# Altium footprint library basicfootprints.PcbLib: 522 footprints (part 24 of 33)
Each footprint in its own frame and in the unit in brackets; x right, y up, seen from the top. Pads: shape width x height; smd on the part's side, far side on the other; paste and mask are expansions set on the pad; w line width, h text height; cw(c..) or ccw(c..) is an arc to the next point about the centre after c.
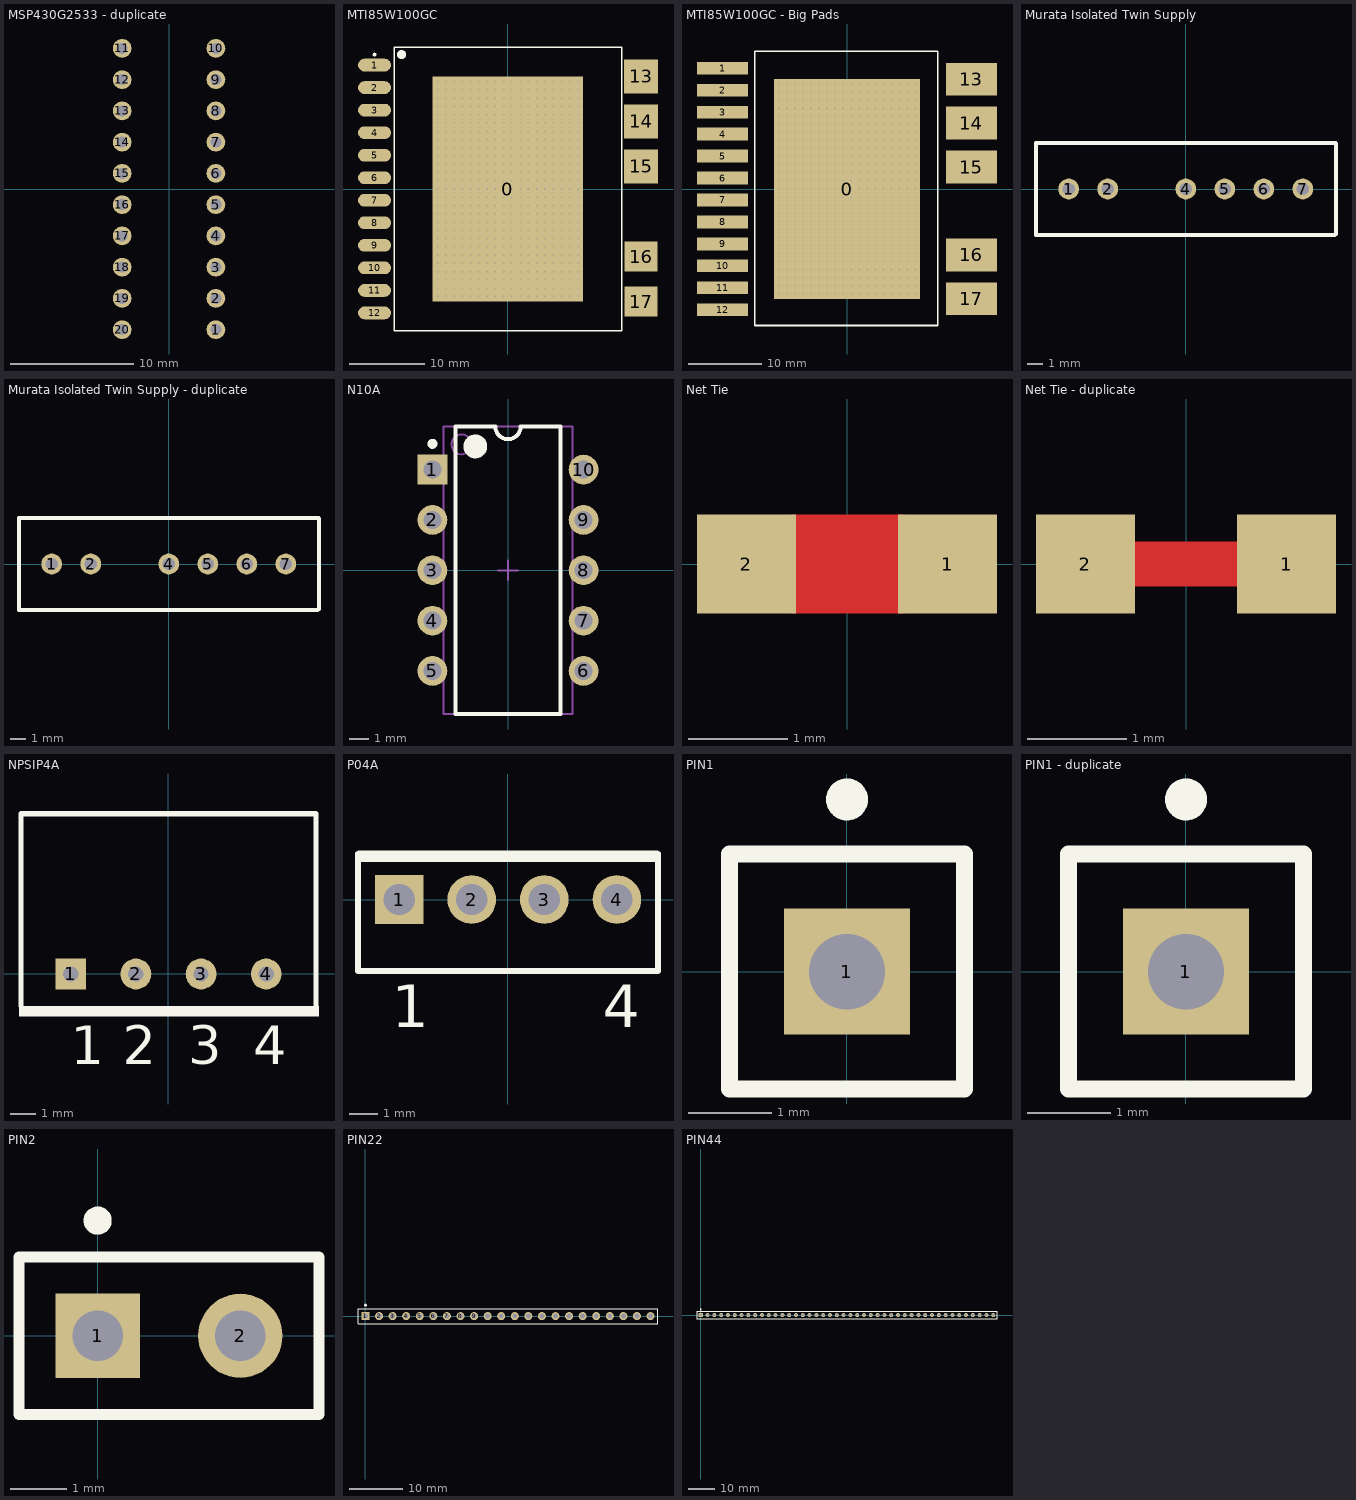
[diagram p23: the footprints below, top view; thin cyan lines are the x and y axes]

## MSP430G2533 - duplicate [mil] "20-pin DIP"
pads (20):
  round 60 hole 35: 1(150,-450) 2(150,-350) 3(150,-250) 4(150,-150) 5(150,-50) 6(150,50) 7(150,150) 8(150,250) 9(150,350) 10(150,450) 11(-150,450) 12(-150,350) 13(-150,250) 14(-150,150) 15(-150,50) 16(-150,-50) 17(-150,-150) 18(-150,-250) 19(-150,-350) 20(-150,-450)

## MTI85W100GC [mm] "3-Phase Bridge, 3.2mOhm"
height 5.1
pads (18):
  rect 20x30 smd: 0(0,0)
  oval 4.4x1.7 smd: 1(-17.75,16.5) 2(-17.75,13.5) 3(-17.75,10.5) 4(-17.75,7.5) 5(-17.75,4.5) 6(-17.75,1.5) 7(-17.75,-1.5) 8(-17.75,-4.5) 9(-17.75,-7.5) 10(-17.75,-10.5) 11(-17.75,-13.5) 12(-17.75,-16.5)
  rect 4.5x4.5 smd: 13(17.75,15) 14(17.75,9) 15(17.75,3)
  rect 4.4x4 smd: 16(17.75,-9) 17(17.75,-15)
via 9.35,-14.3 diameter 0.5 hole 0.2
via 8.25,-14.3 diameter 0.5 hole 0.2
via 7.15,-14.3 diameter 0.5 hole 0.2
via 6.05,-14.3 diameter 0.5 hole 0.2
via 4.95,-14.3 diameter 0.5 hole 0.2
via 3.85,-14.3 diameter 0.5 hole 0.2
via 2.75,-14.3 diameter 0.5 hole 0.2
via 1.65,-14.3 diameter 0.5 hole 0.2
via 0.55,-14.3 diameter 0.5 hole 0.2
via -0.55,-14.3 diameter 0.5 hole 0.2
via -1.65,-14.3 diameter 0.5 hole 0.2
via -2.75,-14.3 diameter 0.5 hole 0.2
via -3.85,-14.3 diameter 0.5 hole 0.2
via -4.95,-14.3 diameter 0.5 hole 0.2
via -6.05,-14.3 diameter 0.5 hole 0.2
via -7.15,-14.3 diameter 0.5 hole 0.2
via -8.25,-14.3 diameter 0.5 hole 0.2
via -9.35,-14.3 diameter 0.5 hole 0.2
via 9.35,-13.2 diameter 0.5 hole 0.2
via 8.25,-13.2 diameter 0.5 hole 0.2
via 7.15,-13.2 diameter 0.5 hole 0.2
via 6.05,-13.2 diameter 0.5 hole 0.2
via 4.95,-13.2 diameter 0.5 hole 0.2
via 3.85,-13.2 diameter 0.5 hole 0.2
via 2.75,-13.2 diameter 0.5 hole 0.2
via 1.65,-13.2 diameter 0.5 hole 0.2
via 0.55,-13.2 diameter 0.5 hole 0.2
via -0.55,-13.2 diameter 0.5 hole 0.2
via -1.65,-13.2 diameter 0.5 hole 0.2
via -2.75,-13.2 diameter 0.5 hole 0.2
via -3.85,-13.2 diameter 0.5 hole 0.2
via -4.95,-13.2 diameter 0.5 hole 0.2
via -6.05,-13.2 diameter 0.5 hole 0.2
via -7.15,-13.2 diameter 0.5 hole 0.2
via -8.25,-13.2 diameter 0.5 hole 0.2
via -9.35,-13.2 diameter 0.5 hole 0.2
via 9.35,-12.1 diameter 0.5 hole 0.2
via 8.25,-12.1 diameter 0.5 hole 0.2
via 7.15,-12.1 diameter 0.5 hole 0.2
via 6.05,-12.1 diameter 0.5 hole 0.2
via 4.95,-12.1 diameter 0.5 hole 0.2
via 3.85,-12.1 diameter 0.5 hole 0.2
via 2.75,-12.1 diameter 0.5 hole 0.2
via 1.65,-12.1 diameter 0.5 hole 0.2
via 0.55,-12.1 diameter 0.5 hole 0.2
via -0.55,-12.1 diameter 0.5 hole 0.2
via -1.65,-12.1 diameter 0.5 hole 0.2
via -2.75,-12.1 diameter 0.5 hole 0.2
via -3.85,-12.1 diameter 0.5 hole 0.2
via -4.95,-12.1 diameter 0.5 hole 0.2
via -6.05,-12.1 diameter 0.5 hole 0.2
via -7.15,-12.1 diameter 0.5 hole 0.2
via -8.25,-12.1 diameter 0.5 hole 0.2
via -9.35,-12.1 diameter 0.5 hole 0.2
via 9.35,-11 diameter 0.5 hole 0.2
via 8.25,-11 diameter 0.5 hole 0.2
via 7.15,-11 diameter 0.5 hole 0.2
via 6.05,-11 diameter 0.5 hole 0.2
via 4.95,-11 diameter 0.5 hole 0.2
via 3.85,-11 diameter 0.5 hole 0.2
via 2.75,-11 diameter 0.5 hole 0.2
via 1.65,-11 diameter 0.5 hole 0.2
via 0.55,-11 diameter 0.5 hole 0.2
via -0.55,-11 diameter 0.5 hole 0.2
via -1.65,-11 diameter 0.5 hole 0.2
via -2.75,-11 diameter 0.5 hole 0.2
via -3.85,-11 diameter 0.5 hole 0.2
via -4.95,-11 diameter 0.5 hole 0.2
via -6.05,-11 diameter 0.5 hole 0.2
via -7.15,-11 diameter 0.5 hole 0.2
via -8.25,-11 diameter 0.5 hole 0.2
via -9.35,-11 diameter 0.5 hole 0.2
via 9.35,-9.9 diameter 0.5 hole 0.2
via 8.25,-9.9 diameter 0.5 hole 0.2
via 7.15,-9.9 diameter 0.5 hole 0.2
via 6.05,-9.9 diameter 0.5 hole 0.2
via 4.95,-9.9 diameter 0.5 hole 0.2
via 3.85,-9.9 diameter 0.5 hole 0.2
via 2.75,-9.9 diameter 0.5 hole 0.2
via 1.65,-9.9 diameter 0.5 hole 0.2
via 0.55,-9.9 diameter 0.5 hole 0.2
via -0.55,-9.9 diameter 0.5 hole 0.2
via -1.65,-9.9 diameter 0.5 hole 0.2
via -2.75,-9.9 diameter 0.5 hole 0.2
via -3.85,-9.9 diameter 0.5 hole 0.2
via -4.95,-9.9 diameter 0.5 hole 0.2
via -6.05,-9.9 diameter 0.5 hole 0.2
via -7.15,-9.9 diameter 0.5 hole 0.2
via -8.25,-9.9 diameter 0.5 hole 0.2
via -9.35,-9.9 diameter 0.5 hole 0.2
via 9.35,-8.8 diameter 0.5 hole 0.2
via 8.25,-8.8 diameter 0.5 hole 0.2
via 7.15,-8.8 diameter 0.5 hole 0.2
via 6.05,-8.8 diameter 0.5 hole 0.2
via 4.95,-8.8 diameter 0.5 hole 0.2
via 3.85,-8.8 diameter 0.5 hole 0.2
via 2.75,-8.8 diameter 0.5 hole 0.2
via 1.65,-8.8 diameter 0.5 hole 0.2
via 0.55,-8.8 diameter 0.5 hole 0.2
via -0.55,-8.8 diameter 0.5 hole 0.2
via -1.65,-8.8 diameter 0.5 hole 0.2
via -2.75,-8.8 diameter 0.5 hole 0.2
via -3.85,-8.8 diameter 0.5 hole 0.2
via -4.95,-8.8 diameter 0.5 hole 0.2
via -6.05,-8.8 diameter 0.5 hole 0.2
via -7.15,-8.8 diameter 0.5 hole 0.2
via -8.25,-8.8 diameter 0.5 hole 0.2
via -9.35,-8.8 diameter 0.5 hole 0.2
via 9.35,-7.7 diameter 0.5 hole 0.2
via 8.25,-7.7 diameter 0.5 hole 0.2
via 7.15,-7.7 diameter 0.5 hole 0.2
via 6.05,-7.7 diameter 0.5 hole 0.2
via 4.95,-7.7 diameter 0.5 hole 0.2
via 3.85,-7.7 diameter 0.5 hole 0.2
via 2.75,-7.7 diameter 0.5 hole 0.2
via 1.65,-7.7 diameter 0.5 hole 0.2
via 0.55,-7.7 diameter 0.5 hole 0.2
via -0.55,-7.7 diameter 0.5 hole 0.2
via -1.65,-7.7 diameter 0.5 hole 0.2
via -2.75,-7.7 diameter 0.5 hole 0.2
via -3.85,-7.7 diameter 0.5 hole 0.2
via -4.95,-7.7 diameter 0.5 hole 0.2
via -6.05,-7.7 diameter 0.5 hole 0.2
via -7.15,-7.7 diameter 0.5 hole 0.2
via -8.25,-7.7 diameter 0.5 hole 0.2
via -9.35,-7.7 diameter 0.5 hole 0.2
via 9.35,-6.6 diameter 0.5 hole 0.2
via 8.25,-6.6 diameter 0.5 hole 0.2
via 7.15,-6.6 diameter 0.5 hole 0.2
via 6.05,-6.6 diameter 0.5 hole 0.2
via 4.95,-6.6 diameter 0.5 hole 0.2
via 3.85,-6.6 diameter 0.5 hole 0.2
via 2.75,-6.6 diameter 0.5 hole 0.2
via 1.65,-6.6 diameter 0.5 hole 0.2
via 0.55,-6.6 diameter 0.5 hole 0.2
via -0.55,-6.6 diameter 0.5 hole 0.2
via -1.65,-6.6 diameter 0.5 hole 0.2
via -2.75,-6.6 diameter 0.5 hole 0.2
via -3.85,-6.6 diameter 0.5 hole 0.2
via -4.95,-6.6 diameter 0.5 hole 0.2
via -6.05,-6.6 diameter 0.5 hole 0.2
via -7.15,-6.6 diameter 0.5 hole 0.2
via -8.25,-6.6 diameter 0.5 hole 0.2
via -9.35,-6.6 diameter 0.5 hole 0.2
via 9.35,-5.5 diameter 0.5 hole 0.2
via 8.25,-5.5 diameter 0.5 hole 0.2
via 7.15,-5.5 diameter 0.5 hole 0.2
via 6.05,-5.5 diameter 0.5 hole 0.2
via 4.95,-5.5 diameter 0.5 hole 0.2
via 3.85,-5.5 diameter 0.5 hole 0.2
via 2.75,-5.5 diameter 0.5 hole 0.2
via 1.65,-5.5 diameter 0.5 hole 0.2
via 0.55,-5.5 diameter 0.5 hole 0.2
via -0.55,-5.5 diameter 0.5 hole 0.2
via -1.65,-5.5 diameter 0.5 hole 0.2
via -2.75,-5.5 diameter 0.5 hole 0.2
via -3.85,-5.5 diameter 0.5 hole 0.2
via -4.95,-5.5 diameter 0.5 hole 0.2
via -6.05,-5.5 diameter 0.5 hole 0.2
via -7.15,-5.5 diameter 0.5 hole 0.2
via -8.25,-5.5 diameter 0.5 hole 0.2
via -9.35,-5.5 diameter 0.5 hole 0.2
via 9.35,-4.4 diameter 0.5 hole 0.2
via 8.25,-4.4 diameter 0.5 hole 0.2
via 7.15,-4.4 diameter 0.5 hole 0.2
via 6.05,-4.4 diameter 0.5 hole 0.2
via 4.95,-4.4 diameter 0.5 hole 0.2
via 3.85,-4.4 diameter 0.5 hole 0.2
via 2.75,-4.4 diameter 0.5 hole 0.2
via 1.65,-4.4 diameter 0.5 hole 0.2
via 0.55,-4.4 diameter 0.5 hole 0.2
via -0.55,-4.4 diameter 0.5 hole 0.2
via -1.65,-4.4 diameter 0.5 hole 0.2
via -2.75,-4.4 diameter 0.5 hole 0.2
via -3.85,-4.4 diameter 0.5 hole 0.2
via -4.95,-4.4 diameter 0.5 hole 0.2
via -6.05,-4.4 diameter 0.5 hole 0.2
via -7.15,-4.4 diameter 0.5 hole 0.2
via -8.25,-4.4 diameter 0.5 hole 0.2
via -9.35,-4.4 diameter 0.5 hole 0.2
via 9.35,-3.3 diameter 0.5 hole 0.2
via 8.25,-3.3 diameter 0.5 hole 0.2
via 7.15,-3.3 diameter 0.5 hole 0.2
via 6.05,-3.3 diameter 0.5 hole 0.2
via 4.95,-3.3 diameter 0.5 hole 0.2
via 3.85,-3.3 diameter 0.5 hole 0.2
via 2.75,-3.3 diameter 0.5 hole 0.2
via 1.65,-3.3 diameter 0.5 hole 0.2
via 0.55,-3.3 diameter 0.5 hole 0.2
via -0.55,-3.3 diameter 0.5 hole 0.2
via -1.65,-3.3 diameter 0.5 hole 0.2
via -2.75,-3.3 diameter 0.5 hole 0.2
via -3.85,-3.3 diameter 0.5 hole 0.2
via -4.95,-3.3 diameter 0.5 hole 0.2
via -6.05,-3.3 diameter 0.5 hole 0.2
via -7.15,-3.3 diameter 0.5 hole 0.2
via -8.25,-3.3 diameter 0.5 hole 0.2
via -9.35,-3.3 diameter 0.5 hole 0.2
via 9.35,-2.2 diameter 0.5 hole 0.2
via 8.25,-2.2 diameter 0.5 hole 0.2
via 7.15,-2.2 diameter 0.5 hole 0.2
via 6.05,-2.2 diameter 0.5 hole 0.2
via 4.95,-2.2 diameter 0.5 hole 0.2
via 3.85,-2.2 diameter 0.5 hole 0.2
via 2.75,-2.2 diameter 0.5 hole 0.2
via 1.65,-2.2 diameter 0.5 hole 0.2
via 0.55,-2.2 diameter 0.5 hole 0.2
via -0.55,-2.2 diameter 0.5 hole 0.2
via -1.65,-2.2 diameter 0.5 hole 0.2
via -2.75,-2.2 diameter 0.5 hole 0.2
via -3.85,-2.2 diameter 0.5 hole 0.2
via -4.95,-2.2 diameter 0.5 hole 0.2
via -6.05,-2.2 diameter 0.5 hole 0.2
via -7.15,-2.2 diameter 0.5 hole 0.2
via -8.25,-2.2 diameter 0.5 hole 0.2
via -9.35,-2.2 diameter 0.5 hole 0.2
via 9.35,-1.1 diameter 0.5 hole 0.2
via 8.25,-1.1 diameter 0.5 hole 0.2
via 7.15,-1.1 diameter 0.5 hole 0.2
via 6.05,-1.1 diameter 0.5 hole 0.2
via 4.95,-1.1 diameter 0.5 hole 0.2
via 3.85,-1.1 diameter 0.5 hole 0.2
via 2.75,-1.1 diameter 0.5 hole 0.2
via 1.65,-1.1 diameter 0.5 hole 0.2
via 0.55,-1.1 diameter 0.5 hole 0.2
via -0.55,-1.1 diameter 0.5 hole 0.2
via -1.65,-1.1 diameter 0.5 hole 0.2
via -2.75,-1.1 diameter 0.5 hole 0.2
via -3.85,-1.1 diameter 0.5 hole 0.2
via -4.95,-1.1 diameter 0.5 hole 0.2
via -6.05,-1.1 diameter 0.5 hole 0.2
via -7.15,-1.1 diameter 0.5 hole 0.2
via -8.25,-1.1 diameter 0.5 hole 0.2
via -9.35,-1.1 diameter 0.5 hole 0.2
via 9.35,0 diameter 0.5 hole 0.2
via 8.25,0 diameter 0.5 hole 0.2
via 7.15,0 diameter 0.5 hole 0.2
via 6.05,0 diameter 0.5 hole 0.2
via 4.95,0 diameter 0.5 hole 0.2
via 3.85,0 diameter 0.5 hole 0.2
via 2.75,0 diameter 0.5 hole 0.2
via 1.65,0 diameter 0.5 hole 0.2
via 0.55,0 diameter 0.5 hole 0.2
via -0.55,0 diameter 0.5 hole 0.2
via -1.65,0 diameter 0.5 hole 0.2
via -2.75,0 diameter 0.5 hole 0.2
via -3.85,0 diameter 0.5 hole 0.2
via -4.95,0 diameter 0.5 hole 0.2
via -6.05,0 diameter 0.5 hole 0.2
via -7.15,0 diameter 0.5 hole 0.2
via -8.25,0 diameter 0.5 hole 0.2
via -9.35,0 diameter 0.5 hole 0.2
via 9.35,1.1 diameter 0.5 hole 0.2
via 8.25,1.1 diameter 0.5 hole 0.2
via 7.15,1.1 diameter 0.5 hole 0.2
via 6.05,1.1 diameter 0.5 hole 0.2
via 4.95,1.1 diameter 0.5 hole 0.2
via 3.85,1.1 diameter 0.5 hole 0.2
via 2.75,1.1 diameter 0.5 hole 0.2
via 1.65,1.1 diameter 0.5 hole 0.2
via 0.55,1.1 diameter 0.5 hole 0.2
via -0.55,1.1 diameter 0.5 hole 0.2
via -1.65,1.1 diameter 0.5 hole 0.2
via -2.75,1.1 diameter 0.5 hole 0.2
via -3.85,1.1 diameter 0.5 hole 0.2
via -4.95,1.1 diameter 0.5 hole 0.2
via -6.05,1.1 diameter 0.5 hole 0.2
via -7.15,1.1 diameter 0.5 hole 0.2
via -8.25,1.1 diameter 0.5 hole 0.2
via -9.35,1.1 diameter 0.5 hole 0.2
via 9.35,2.2 diameter 0.5 hole 0.2
via 8.25,2.2 diameter 0.5 hole 0.2
via 7.15,2.2 diameter 0.5 hole 0.2
via 6.05,2.2 diameter 0.5 hole 0.2
via 4.95,2.2 diameter 0.5 hole 0.2
via 3.85,2.2 diameter 0.5 hole 0.2
via 2.75,2.2 diameter 0.5 hole 0.2
via 1.65,2.2 diameter 0.5 hole 0.2
via 0.55,2.2 diameter 0.5 hole 0.2
via -0.55,2.2 diameter 0.5 hole 0.2
via -1.65,2.2 diameter 0.5 hole 0.2
via -2.75,2.2 diameter 0.5 hole 0.2
via -3.85,2.2 diameter 0.5 hole 0.2
via -4.95,2.2 diameter 0.5 hole 0.2
via -6.05,2.2 diameter 0.5 hole 0.2
via -7.15,2.2 diameter 0.5 hole 0.2
via -8.25,2.2 diameter 0.5 hole 0.2
via -9.35,2.2 diameter 0.5 hole 0.2
via 9.35,3.3 diameter 0.5 hole 0.2
via 8.25,3.3 diameter 0.5 hole 0.2
via 7.15,3.3 diameter 0.5 hole 0.2
via 6.05,3.3 diameter 0.5 hole 0.2
via 4.95,3.3 diameter 0.5 hole 0.2
via 3.85,3.3 diameter 0.5 hole 0.2
via 2.75,3.3 diameter 0.5 hole 0.2
via 1.65,3.3 diameter 0.5 hole 0.2
via 0.55,3.3 diameter 0.5 hole 0.2
via -0.55,3.3 diameter 0.5 hole 0.2
via -1.65,3.3 diameter 0.5 hole 0.2
via -2.75,3.3 diameter 0.5 hole 0.2
via -3.85,3.3 diameter 0.5 hole 0.2
via -4.95,3.3 diameter 0.5 hole 0.2
via -6.05,3.3 diameter 0.5 hole 0.2
via -7.15,3.3 diameter 0.5 hole 0.2
via -8.25,3.3 diameter 0.5 hole 0.2
via -9.35,3.3 diameter 0.5 hole 0.2
via 9.35,4.4 diameter 0.5 hole 0.2
via 8.25,4.4 diameter 0.5 hole 0.2
via 7.15,4.4 diameter 0.5 hole 0.2
via 6.05,4.4 diameter 0.5 hole 0.2
via 4.95,4.4 diameter 0.5 hole 0.2
via 3.85,4.4 diameter 0.5 hole 0.2
via 2.75,4.4 diameter 0.5 hole 0.2
via 1.65,4.4 diameter 0.5 hole 0.2
via 0.55,4.4 diameter 0.5 hole 0.2
via -0.55,4.4 diameter 0.5 hole 0.2
via -1.65,4.4 diameter 0.5 hole 0.2
via -2.75,4.4 diameter 0.5 hole 0.2
via -3.85,4.4 diameter 0.5 hole 0.2
via -4.95,4.4 diameter 0.5 hole 0.2
via -6.05,4.4 diameter 0.5 hole 0.2
via -7.15,4.4 diameter 0.5 hole 0.2
via -8.25,4.4 diameter 0.5 hole 0.2
via -9.35,4.4 diameter 0.5 hole 0.2
via 9.35,5.5 diameter 0.5 hole 0.2
via 8.25,5.5 diameter 0.5 hole 0.2
via 7.15,5.5 diameter 0.5 hole 0.2
via 6.05,5.5 diameter 0.5 hole 0.2
via 4.95,5.5 diameter 0.5 hole 0.2
via 3.85,5.5 diameter 0.5 hole 0.2
via 2.75,5.5 diameter 0.5 hole 0.2
via 1.65,5.5 diameter 0.5 hole 0.2
via 0.55,5.5 diameter 0.5 hole 0.2
via -0.55,5.5 diameter 0.5 hole 0.2
via -1.65,5.5 diameter 0.5 hole 0.2
via -2.75,5.5 diameter 0.5 hole 0.2
via -3.85,5.5 diameter 0.5 hole 0.2
via -4.95,5.5 diameter 0.5 hole 0.2
via -6.05,5.5 diameter 0.5 hole 0.2
via -7.15,5.5 diameter 0.5 hole 0.2
via -8.25,5.5 diameter 0.5 hole 0.2
via -9.35,5.5 diameter 0.5 hole 0.2
via 9.35,6.6 diameter 0.5 hole 0.2
via 8.25,6.6 diameter 0.5 hole 0.2
via 7.15,6.6 diameter 0.5 hole 0.2
via 6.05,6.6 diameter 0.5 hole 0.2
via 4.95,6.6 diameter 0.5 hole 0.2
via 3.85,6.6 diameter 0.5 hole 0.2
via 2.75,6.6 diameter 0.5 hole 0.2
via 1.65,6.6 diameter 0.5 hole 0.2
via 0.55,6.6 diameter 0.5 hole 0.2
via -0.55,6.6 diameter 0.5 hole 0.2
via -1.65,6.6 diameter 0.5 hole 0.2
via -2.75,6.6 diameter 0.5 hole 0.2
via -3.85,6.6 diameter 0.5 hole 0.2
via -4.95,6.6 diameter 0.5 hole 0.2
via -6.05,6.6 diameter 0.5 hole 0.2
via -7.15,6.6 diameter 0.5 hole 0.2
via -8.25,6.6 diameter 0.5 hole 0.2
via -9.35,6.6 diameter 0.5 hole 0.2
via 9.35,7.7 diameter 0.5 hole 0.2
via 8.25,7.7 diameter 0.5 hole 0.2
via 7.15,7.7 diameter 0.5 hole 0.2
via 6.05,7.7 diameter 0.5 hole 0.2
via 4.95,7.7 diameter 0.5 hole 0.2
via 3.85,7.7 diameter 0.5 hole 0.2
via 2.75,7.7 diameter 0.5 hole 0.2
via 1.65,7.7 diameter 0.5 hole 0.2
via 0.55,7.7 diameter 0.5 hole 0.2
via -0.55,7.7 diameter 0.5 hole 0.2
via -1.65,7.7 diameter 0.5 hole 0.2
via -2.75,7.7 diameter 0.5 hole 0.2
via -3.85,7.7 diameter 0.5 hole 0.2
via -4.95,7.7 diameter 0.5 hole 0.2
via -6.05,7.7 diameter 0.5 hole 0.2
via -7.15,7.7 diameter 0.5 hole 0.2
via -8.25,7.7 diameter 0.5 hole 0.2
via -9.35,7.7 diameter 0.5 hole 0.2
via 9.35,8.8 diameter 0.5 hole 0.2
via 8.25,8.8 diameter 0.5 hole 0.2
via 7.15,8.8 diameter 0.5 hole 0.2
via 6.05,8.8 diameter 0.5 hole 0.2
via 4.95,8.8 diameter 0.5 hole 0.2
via 3.85,8.8 diameter 0.5 hole 0.2
via 2.75,8.8 diameter 0.5 hole 0.2
via 1.65,8.8 diameter 0.5 hole 0.2
via 0.55,8.8 diameter 0.5 hole 0.2
via -0.55,8.8 diameter 0.5 hole 0.2
via -1.65,8.8 diameter 0.5 hole 0.2
via -2.75,8.8 diameter 0.5 hole 0.2
via -3.85,8.8 diameter 0.5 hole 0.2
via -4.95,8.8 diameter 0.5 hole 0.2
via -6.05,8.8 diameter 0.5 hole 0.2
via -7.15,8.8 diameter 0.5 hole 0.2
via -8.25,8.8 diameter 0.5 hole 0.2
via -9.35,8.8 diameter 0.5 hole 0.2
via 9.35,9.9 diameter 0.5 hole 0.2
via 8.25,9.9 diameter 0.5 hole 0.2
via 7.15,9.9 diameter 0.5 hole 0.2
via 6.05,9.9 diameter 0.5 hole 0.2
via 4.95,9.9 diameter 0.5 hole 0.2
via 3.85,9.9 diameter 0.5 hole 0.2
via 2.75,9.9 diameter 0.5 hole 0.2
via 1.65,9.9 diameter 0.5 hole 0.2
via 0.55,9.9 diameter 0.5 hole 0.2
via -0.55,9.9 diameter 0.5 hole 0.2
via -1.65,9.9 diameter 0.5 hole 0.2
via -2.75,9.9 diameter 0.5 hole 0.2
via -3.85,9.9 diameter 0.5 hole 0.2
via -4.95,9.9 diameter 0.5 hole 0.2
via -6.05,9.9 diameter 0.5 hole 0.2
via -7.15,9.9 diameter 0.5 hole 0.2
via -8.25,9.9 diameter 0.5 hole 0.2
via -9.35,9.9 diameter 0.5 hole 0.2
via 9.35,11 diameter 0.5 hole 0.2
via 8.25,11 diameter 0.5 hole 0.2
via 7.15,11 diameter 0.5 hole 0.2
via 6.05,11 diameter 0.5 hole 0.2
via 4.95,11 diameter 0.5 hole 0.2
via 3.85,11 diameter 0.5 hole 0.2
via 2.75,11 diameter 0.5 hole 0.2
via 1.65,11 diameter 0.5 hole 0.2
via 0.55,11 diameter 0.5 hole 0.2
via -0.55,11 diameter 0.5 hole 0.2
via -1.65,11 diameter 0.5 hole 0.2
via -2.75,11 diameter 0.5 hole 0.2
via -3.85,11 diameter 0.5 hole 0.2
via -4.95,11 diameter 0.5 hole 0.2
via -6.05,11 diameter 0.5 hole 0.2
via -7.15,11 diameter 0.5 hole 0.2
via -8.25,11 diameter 0.5 hole 0.2
via -9.35,11 diameter 0.5 hole 0.2
via 9.35,12.1 diameter 0.5 hole 0.2
via 8.25,12.1 diameter 0.5 hole 0.2
via 7.15,12.1 diameter 0.5 hole 0.2
via 6.05,12.1 diameter 0.5 hole 0.2
via 4.95,12.1 diameter 0.5 hole 0.2
via 3.85,12.1 diameter 0.5 hole 0.2
via 2.75,12.1 diameter 0.5 hole 0.2
via 1.65,12.1 diameter 0.5 hole 0.2
via 0.55,12.1 diameter 0.5 hole 0.2
via -0.55,12.1 diameter 0.5 hole 0.2
via -1.65,12.1 diameter 0.5 hole 0.2
via -2.75,12.1 diameter 0.5 hole 0.2
via -3.85,12.1 diameter 0.5 hole 0.2
via -4.95,12.1 diameter 0.5 hole 0.2
via -6.05,12.1 diameter 0.5 hole 0.2
via -7.15,12.1 diameter 0.5 hole 0.2
via -8.25,12.1 diameter 0.5 hole 0.2
via -9.35,12.1 diameter 0.5 hole 0.2
via 9.35,13.2 diameter 0.5 hole 0.2
via 8.25,13.2 diameter 0.5 hole 0.2
via 7.15,13.2 diameter 0.5 hole 0.2
via 6.05,13.2 diameter 0.5 hole 0.2
via 4.95,13.2 diameter 0.5 hole 0.2
via 3.85,13.2 diameter 0.5 hole 0.2
via 2.75,13.2 diameter 0.5 hole 0.2
via 1.65,13.2 diameter 0.5 hole 0.2
via 0.55,13.2 diameter 0.5 hole 0.2
via -0.55,13.2 diameter 0.5 hole 0.2
via -1.65,13.2 diameter 0.5 hole 0.2
via -2.75,13.2 diameter 0.5 hole 0.2
via -3.85,13.2 diameter 0.5 hole 0.2
via -4.95,13.2 diameter 0.5 hole 0.2
via -6.05,13.2 diameter 0.5 hole 0.2
via -7.15,13.2 diameter 0.5 hole 0.2
via -8.25,13.2 diameter 0.5 hole 0.2
via -9.35,13.2 diameter 0.5 hole 0.2
via 9.35,14.3 diameter 0.5 hole 0.2
via 8.25,14.3 diameter 0.5 hole 0.2
via 7.15,14.3 diameter 0.5 hole 0.2
via 6.05,14.3 diameter 0.5 hole 0.2
via 4.95,14.3 diameter 0.5 hole 0.2
via 3.85,14.3 diameter 0.5 hole 0.2
via 2.75,14.3 diameter 0.5 hole 0.2
via 1.65,14.3 diameter 0.5 hole 0.2
via 0.55,14.3 diameter 0.5 hole 0.2
via -0.55,14.3 diameter 0.5 hole 0.2
via -1.65,14.3 diameter 0.5 hole 0.2
via -2.75,14.3 diameter 0.5 hole 0.2
via -3.85,14.3 diameter 0.5 hole 0.2
via -4.95,14.3 diameter 0.5 hole 0.2
via -6.05,14.3 diameter 0.5 hole 0.2
via -7.15,14.3 diameter 0.5 hole 0.2
via -8.25,14.3 diameter 0.5 hole 0.2
via -9.35,14.3 diameter 0.5 hole 0.2
Top Overlay:
  circle w0.6: c-14.15,17.9 r0.3
  circle w0.25: c-17.75,17.9 r0.125
  lines w0.2: -15.15,-18.9 15.15,-18.9 15.15,18.9 -15.15,18.9 -15.15,-18.9
3D body: height 5.1, standoff 0.05, extent -12.65,-18.9 12.65,18.9

## MTI85W100GC - Big Pads [mm] "IXYS Three phase full Bridge"
pads (18):
  rect 20x30 smd: 0(0,0)
  rect 7x1.75 smd: 1(-17,16.5) 2(-17,13.5) 3(-17,10.5) 4(-17,7.5) 5(-17,4.5) 6(-17,1.5) 7(-17,-1.5) 8(-17,-4.5) 9(-17,-7.5) 10(-17,-10.5) 11(-17,-13.5) 12(-17,-16.5)
  rect 7x4.5 smd: 13(17,15) 14(17,9) 15(17,3) 16(17,-9) 17(17,-15)
via -9.35,14.3 diameter 0.5 hole 0.2
via -8.25,14.3 diameter 0.5 hole 0.2
via -7.15,14.3 diameter 0.5 hole 0.2
via -6.05,14.3 diameter 0.5 hole 0.2
via -4.95,14.3 diameter 0.5 hole 0.2
via -3.85,14.3 diameter 0.5 hole 0.2
via -2.75,14.3 diameter 0.5 hole 0.2
via -1.65,14.3 diameter 0.5 hole 0.2
via -0.55,14.3 diameter 0.5 hole 0.2
via 0.55,14.3 diameter 0.5 hole 0.2
via 1.65,14.3 diameter 0.5 hole 0.2
via 2.75,14.3 diameter 0.5 hole 0.2
via 3.85,14.3 diameter 0.5 hole 0.2
via 4.95,14.3 diameter 0.5 hole 0.2
via 6.05,14.3 diameter 0.5 hole 0.2
via 7.15,14.3 diameter 0.5 hole 0.2
via 8.25,14.3 diameter 0.5 hole 0.2
via 9.35,14.3 diameter 0.5 hole 0.2
via -9.35,13.2 diameter 0.5 hole 0.2
via -8.25,13.2 diameter 0.5 hole 0.2
via -7.15,13.2 diameter 0.5 hole 0.2
via -6.05,13.2 diameter 0.5 hole 0.2
via -4.95,13.2 diameter 0.5 hole 0.2
via -3.85,13.2 diameter 0.5 hole 0.2
via -2.75,13.2 diameter 0.5 hole 0.2
via -1.65,13.2 diameter 0.5 hole 0.2
via -0.55,13.2 diameter 0.5 hole 0.2
via 0.55,13.2 diameter 0.5 hole 0.2
via 1.65,13.2 diameter 0.5 hole 0.2
via 2.75,13.2 diameter 0.5 hole 0.2
via 3.85,13.2 diameter 0.5 hole 0.2
via 4.95,13.2 diameter 0.5 hole 0.2
via 6.05,13.2 diameter 0.5 hole 0.2
via 7.15,13.2 diameter 0.5 hole 0.2
via 8.25,13.2 diameter 0.5 hole 0.2
via 9.35,13.2 diameter 0.5 hole 0.2
via -9.35,12.1 diameter 0.5 hole 0.2
via -8.25,12.1 diameter 0.5 hole 0.2
via -7.15,12.1 diameter 0.5 hole 0.2
via -6.05,12.1 diameter 0.5 hole 0.2
via -4.95,12.1 diameter 0.5 hole 0.2
via -3.85,12.1 diameter 0.5 hole 0.2
via -2.75,12.1 diameter 0.5 hole 0.2
via -1.65,12.1 diameter 0.5 hole 0.2
via -0.55,12.1 diameter 0.5 hole 0.2
via 0.55,12.1 diameter 0.5 hole 0.2
via 1.65,12.1 diameter 0.5 hole 0.2
via 2.75,12.1 diameter 0.5 hole 0.2
via 3.85,12.1 diameter 0.5 hole 0.2
via 4.95,12.1 diameter 0.5 hole 0.2
via 6.05,12.1 diameter 0.5 hole 0.2
via 7.15,12.1 diameter 0.5 hole 0.2
via 8.25,12.1 diameter 0.5 hole 0.2
via 9.35,12.1 diameter 0.5 hole 0.2
via -9.35,11 diameter 0.5 hole 0.2
via -8.25,11 diameter 0.5 hole 0.2
via -7.15,11 diameter 0.5 hole 0.2
via -6.05,11 diameter 0.5 hole 0.2
via -4.95,11 diameter 0.5 hole 0.2
via -3.85,11 diameter 0.5 hole 0.2
via -2.75,11 diameter 0.5 hole 0.2
via -1.65,11 diameter 0.5 hole 0.2
via -0.55,11 diameter 0.5 hole 0.2
via 0.55,11 diameter 0.5 hole 0.2
via 1.65,11 diameter 0.5 hole 0.2
via 2.75,11 diameter 0.5 hole 0.2
via 3.85,11 diameter 0.5 hole 0.2
via 4.95,11 diameter 0.5 hole 0.2
via 6.05,11 diameter 0.5 hole 0.2
via 7.15,11 diameter 0.5 hole 0.2
via 8.25,11 diameter 0.5 hole 0.2
via 9.35,11 diameter 0.5 hole 0.2
via -9.35,9.9 diameter 0.5 hole 0.2
via -8.25,9.9 diameter 0.5 hole 0.2
via -7.15,9.9 diameter 0.5 hole 0.2
via -6.05,9.9 diameter 0.5 hole 0.2
via -4.95,9.9 diameter 0.5 hole 0.2
via -3.85,9.9 diameter 0.5 hole 0.2
via -2.75,9.9 diameter 0.5 hole 0.2
via -1.65,9.9 diameter 0.5 hole 0.2
via -0.55,9.9 diameter 0.5 hole 0.2
via 0.55,9.9 diameter 0.5 hole 0.2
via 1.65,9.9 diameter 0.5 hole 0.2
via 2.75,9.9 diameter 0.5 hole 0.2
via 3.85,9.9 diameter 0.5 hole 0.2
via 4.95,9.9 diameter 0.5 hole 0.2
via 6.05,9.9 diameter 0.5 hole 0.2
via 7.15,9.9 diameter 0.5 hole 0.2
via 8.25,9.9 diameter 0.5 hole 0.2
via 9.35,9.9 diameter 0.5 hole 0.2
via -9.35,8.8 diameter 0.5 hole 0.2
via -8.25,8.8 diameter 0.5 hole 0.2
via -7.15,8.8 diameter 0.5 hole 0.2
via -6.05,8.8 diameter 0.5 hole 0.2
via -4.95,8.8 diameter 0.5 hole 0.2
via -3.85,8.8 diameter 0.5 hole 0.2
via -2.75,8.8 diameter 0.5 hole 0.2
via -1.65,8.8 diameter 0.5 hole 0.2
via -0.55,8.8 diameter 0.5 hole 0.2
via 0.55,8.8 diameter 0.5 hole 0.2
via 1.65,8.8 diameter 0.5 hole 0.2
via 2.75,8.8 diameter 0.5 hole 0.2
via 3.85,8.8 diameter 0.5 hole 0.2
via 4.95,8.8 diameter 0.5 hole 0.2
via 6.05,8.8 diameter 0.5 hole 0.2
via 7.15,8.8 diameter 0.5 hole 0.2
via 8.25,8.8 diameter 0.5 hole 0.2
via 9.35,8.8 diameter 0.5 hole 0.2
via -9.35,7.7 diameter 0.5 hole 0.2
via -8.25,7.7 diameter 0.5 hole 0.2
via -7.15,7.7 diameter 0.5 hole 0.2
via -6.05,7.7 diameter 0.5 hole 0.2
via -4.95,7.7 diameter 0.5 hole 0.2
via -3.85,7.7 diameter 0.5 hole 0.2
via -2.75,7.7 diameter 0.5 hole 0.2
via -1.65,7.7 diameter 0.5 hole 0.2
via -0.55,7.7 diameter 0.5 hole 0.2
via 0.55,7.7 diameter 0.5 hole 0.2
via 1.65,7.7 diameter 0.5 hole 0.2
via 2.75,7.7 diameter 0.5 hole 0.2
via 3.85,7.7 diameter 0.5 hole 0.2
via 4.95,7.7 diameter 0.5 hole 0.2
via 6.05,7.7 diameter 0.5 hole 0.2
via 7.15,7.7 diameter 0.5 hole 0.2
via 8.25,7.7 diameter 0.5 hole 0.2
via 9.35,7.7 diameter 0.5 hole 0.2
via -9.35,6.6 diameter 0.5 hole 0.2
via -8.25,6.6 diameter 0.5 hole 0.2
via -7.15,6.6 diameter 0.5 hole 0.2
via -6.05,6.6 diameter 0.5 hole 0.2
via -4.95,6.6 diameter 0.5 hole 0.2
via -3.85,6.6 diameter 0.5 hole 0.2
via -2.75,6.6 diameter 0.5 hole 0.2
via -1.65,6.6 diameter 0.5 hole 0.2
via -0.55,6.6 diameter 0.5 hole 0.2
via 0.55,6.6 diameter 0.5 hole 0.2
via 1.65,6.6 diameter 0.5 hole 0.2
via 2.75,6.6 diameter 0.5 hole 0.2
via 3.85,6.6 diameter 0.5 hole 0.2
via 4.95,6.6 diameter 0.5 hole 0.2
via 6.05,6.6 diameter 0.5 hole 0.2
via 7.15,6.6 diameter 0.5 hole 0.2
via 8.25,6.6 diameter 0.5 hole 0.2
via 9.35,6.6 diameter 0.5 hole 0.2
via -9.35,5.5 diameter 0.5 hole 0.2
via -8.25,5.5 diameter 0.5 hole 0.2
via -7.15,5.5 diameter 0.5 hole 0.2
via -6.05,5.5 diameter 0.5 hole 0.2
via -4.95,5.5 diameter 0.5 hole 0.2
via -3.85,5.5 diameter 0.5 hole 0.2
via -2.75,5.5 diameter 0.5 hole 0.2
via -1.65,5.5 diameter 0.5 hole 0.2
via -0.55,5.5 diameter 0.5 hole 0.2
via 0.55,5.5 diameter 0.5 hole 0.2
via 1.65,5.5 diameter 0.5 hole 0.2
via 2.75,5.5 diameter 0.5 hole 0.2
via 3.85,5.5 diameter 0.5 hole 0.2
via 4.95,5.5 diameter 0.5 hole 0.2
via 6.05,5.5 diameter 0.5 hole 0.2
via 7.15,5.5 diameter 0.5 hole 0.2
via 8.25,5.5 diameter 0.5 hole 0.2
via 9.35,5.5 diameter 0.5 hole 0.2
via -9.35,4.4 diameter 0.5 hole 0.2
via -8.25,4.4 diameter 0.5 hole 0.2
via -7.15,4.4 diameter 0.5 hole 0.2
via -6.05,4.4 diameter 0.5 hole 0.2
via -4.95,4.4 diameter 0.5 hole 0.2
via -3.85,4.4 diameter 0.5 hole 0.2
via -2.75,4.4 diameter 0.5 hole 0.2
via -1.65,4.4 diameter 0.5 hole 0.2
via -0.55,4.4 diameter 0.5 hole 0.2
via 0.55,4.4 diameter 0.5 hole 0.2
via 1.65,4.4 diameter 0.5 hole 0.2
via 2.75,4.4 diameter 0.5 hole 0.2
via 3.85,4.4 diameter 0.5 hole 0.2
via 4.95,4.4 diameter 0.5 hole 0.2
via 6.05,4.4 diameter 0.5 hole 0.2
via 7.15,4.4 diameter 0.5 hole 0.2
via 8.25,4.4 diameter 0.5 hole 0.2
via 9.35,4.4 diameter 0.5 hole 0.2
via -9.35,3.3 diameter 0.5 hole 0.2
via -8.25,3.3 diameter 0.5 hole 0.2
via -7.15,3.3 diameter 0.5 hole 0.2
via -6.05,3.3 diameter 0.5 hole 0.2
via -4.95,3.3 diameter 0.5 hole 0.2
via -3.85,3.3 diameter 0.5 hole 0.2
via -2.75,3.3 diameter 0.5 hole 0.2
via -1.65,3.3 diameter 0.5 hole 0.2
via -0.55,3.3 diameter 0.5 hole 0.2
via 0.55,3.3 diameter 0.5 hole 0.2
via 1.65,3.3 diameter 0.5 hole 0.2
via 2.75,3.3 diameter 0.5 hole 0.2
via 3.85,3.3 diameter 0.5 hole 0.2
via 4.95,3.3 diameter 0.5 hole 0.2
via 6.05,3.3 diameter 0.5 hole 0.2
via 7.15,3.3 diameter 0.5 hole 0.2
via 8.25,3.3 diameter 0.5 hole 0.2
via 9.35,3.3 diameter 0.5 hole 0.2
via -9.35,2.2 diameter 0.5 hole 0.2
via -8.25,2.2 diameter 0.5 hole 0.2
via -7.15,2.2 diameter 0.5 hole 0.2
via -6.05,2.2 diameter 0.5 hole 0.2
via -4.95,2.2 diameter 0.5 hole 0.2
via -3.85,2.2 diameter 0.5 hole 0.2
via -2.75,2.2 diameter 0.5 hole 0.2
via -1.65,2.2 diameter 0.5 hole 0.2
via -0.55,2.2 diameter 0.5 hole 0.2
via 0.55,2.2 diameter 0.5 hole 0.2
via 1.65,2.2 diameter 0.5 hole 0.2
via 2.75,2.2 diameter 0.5 hole 0.2
via 3.85,2.2 diameter 0.5 hole 0.2
via 4.95,2.2 diameter 0.5 hole 0.2
via 6.05,2.2 diameter 0.5 hole 0.2
via 7.15,2.2 diameter 0.5 hole 0.2
via 8.25,2.2 diameter 0.5 hole 0.2
via 9.35,2.2 diameter 0.5 hole 0.2
via -9.35,1.1 diameter 0.5 hole 0.2
via -8.25,1.1 diameter 0.5 hole 0.2
via -7.15,1.1 diameter 0.5 hole 0.2
via -6.05,1.1 diameter 0.5 hole 0.2
via -4.95,1.1 diameter 0.5 hole 0.2
via -3.85,1.1 diameter 0.5 hole 0.2
via -2.75,1.1 diameter 0.5 hole 0.2
via -1.65,1.1 diameter 0.5 hole 0.2
via -0.55,1.1 diameter 0.5 hole 0.2
via 0.55,1.1 diameter 0.5 hole 0.2
via 1.65,1.1 diameter 0.5 hole 0.2
via 2.75,1.1 diameter 0.5 hole 0.2
via 3.85,1.1 diameter 0.5 hole 0.2
via 4.95,1.1 diameter 0.5 hole 0.2
via 6.05,1.1 diameter 0.5 hole 0.2
via 7.15,1.1 diameter 0.5 hole 0.2
via 8.25,1.1 diameter 0.5 hole 0.2
via 9.35,1.1 diameter 0.5 hole 0.2
via -9.35,0 diameter 0.5 hole 0.2
via -8.25,0 diameter 0.5 hole 0.2
via -7.15,0 diameter 0.5 hole 0.2
via -6.05,0 diameter 0.5 hole 0.2
via -4.95,0 diameter 0.5 hole 0.2
via -3.85,0 diameter 0.5 hole 0.2
via -2.75,0 diameter 0.5 hole 0.2
via -1.65,0 diameter 0.5 hole 0.2
via -0.55,0 diameter 0.5 hole 0.2
via 0.55,0 diameter 0.5 hole 0.2
via 1.65,0 diameter 0.5 hole 0.2
via 2.75,0 diameter 0.5 hole 0.2
via 3.85,0 diameter 0.5 hole 0.2
via 4.95,0 diameter 0.5 hole 0.2
via 6.05,0 diameter 0.5 hole 0.2
via 7.15,0 diameter 0.5 hole 0.2
via 8.25,0 diameter 0.5 hole 0.2
via 9.35,0 diameter 0.5 hole 0.2
via -9.35,-1.1 diameter 0.5 hole 0.2
via -8.25,-1.1 diameter 0.5 hole 0.2
via -7.15,-1.1 diameter 0.5 hole 0.2
via -6.05,-1.1 diameter 0.5 hole 0.2
via -4.95,-1.1 diameter 0.5 hole 0.2
via -3.85,-1.1 diameter 0.5 hole 0.2
via -2.75,-1.1 diameter 0.5 hole 0.2
via -1.65,-1.1 diameter 0.5 hole 0.2
via -0.55,-1.1 diameter 0.5 hole 0.2
via 0.55,-1.1 diameter 0.5 hole 0.2
via 1.65,-1.1 diameter 0.5 hole 0.2
via 2.75,-1.1 diameter 0.5 hole 0.2
via 3.85,-1.1 diameter 0.5 hole 0.2
via 4.95,-1.1 diameter 0.5 hole 0.2
via 6.05,-1.1 diameter 0.5 hole 0.2
via 7.15,-1.1 diameter 0.5 hole 0.2
via 8.25,-1.1 diameter 0.5 hole 0.2
via 9.35,-1.1 diameter 0.5 hole 0.2
via -9.35,-2.2 diameter 0.5 hole 0.2
via -8.25,-2.2 diameter 0.5 hole 0.2
via -7.15,-2.2 diameter 0.5 hole 0.2
via -6.05,-2.2 diameter 0.5 hole 0.2
via -4.95,-2.2 diameter 0.5 hole 0.2
via -3.85,-2.2 diameter 0.5 hole 0.2
via -2.75,-2.2 diameter 0.5 hole 0.2
via -1.65,-2.2 diameter 0.5 hole 0.2
via -0.55,-2.2 diameter 0.5 hole 0.2
via 0.55,-2.2 diameter 0.5 hole 0.2
via 1.65,-2.2 diameter 0.5 hole 0.2
via 2.75,-2.2 diameter 0.5 hole 0.2
via 3.85,-2.2 diameter 0.5 hole 0.2
via 4.95,-2.2 diameter 0.5 hole 0.2
via 6.05,-2.2 diameter 0.5 hole 0.2
via 7.15,-2.2 diameter 0.5 hole 0.2
via 8.25,-2.2 diameter 0.5 hole 0.2
via 9.35,-2.2 diameter 0.5 hole 0.2
via -9.35,-3.3 diameter 0.5 hole 0.2
via -8.25,-3.3 diameter 0.5 hole 0.2
via -7.15,-3.3 diameter 0.5 hole 0.2
via -6.05,-3.3 diameter 0.5 hole 0.2
via -4.95,-3.3 diameter 0.5 hole 0.2
via -3.85,-3.3 diameter 0.5 hole 0.2
via -2.75,-3.3 diameter 0.5 hole 0.2
via -1.65,-3.3 diameter 0.5 hole 0.2
via -0.55,-3.3 diameter 0.5 hole 0.2
via 0.55,-3.3 diameter 0.5 hole 0.2
via 1.65,-3.3 diameter 0.5 hole 0.2
via 2.75,-3.3 diameter 0.5 hole 0.2
via 3.85,-3.3 diameter 0.5 hole 0.2
via 4.95,-3.3 diameter 0.5 hole 0.2
via 6.05,-3.3 diameter 0.5 hole 0.2
via 7.15,-3.3 diameter 0.5 hole 0.2
via 8.25,-3.3 diameter 0.5 hole 0.2
via 9.35,-3.3 diameter 0.5 hole 0.2
via -9.35,-4.4 diameter 0.5 hole 0.2
via -8.25,-4.4 diameter 0.5 hole 0.2
via -7.15,-4.4 diameter 0.5 hole 0.2
via -6.05,-4.4 diameter 0.5 hole 0.2
via -4.95,-4.4 diameter 0.5 hole 0.2
via -3.85,-4.4 diameter 0.5 hole 0.2
via -2.75,-4.4 diameter 0.5 hole 0.2
via -1.65,-4.4 diameter 0.5 hole 0.2
via -0.55,-4.4 diameter 0.5 hole 0.2
via 0.55,-4.4 diameter 0.5 hole 0.2
via 1.65,-4.4 diameter 0.5 hole 0.2
via 2.75,-4.4 diameter 0.5 hole 0.2
via 3.85,-4.4 diameter 0.5 hole 0.2
via 4.95,-4.4 diameter 0.5 hole 0.2
via 6.05,-4.4 diameter 0.5 hole 0.2
via 7.15,-4.4 diameter 0.5 hole 0.2
via 8.25,-4.4 diameter 0.5 hole 0.2
via 9.35,-4.4 diameter 0.5 hole 0.2
via -9.35,-5.5 diameter 0.5 hole 0.2
via -8.25,-5.5 diameter 0.5 hole 0.2
via -7.15,-5.5 diameter 0.5 hole 0.2
via -6.05,-5.5 diameter 0.5 hole 0.2
via -4.95,-5.5 diameter 0.5 hole 0.2
via -3.85,-5.5 diameter 0.5 hole 0.2
via -2.75,-5.5 diameter 0.5 hole 0.2
via -1.65,-5.5 diameter 0.5 hole 0.2
via -0.55,-5.5 diameter 0.5 hole 0.2
via 0.55,-5.5 diameter 0.5 hole 0.2
via 1.65,-5.5 diameter 0.5 hole 0.2
via 2.75,-5.5 diameter 0.5 hole 0.2
via 3.85,-5.5 diameter 0.5 hole 0.2
via 4.95,-5.5 diameter 0.5 hole 0.2
via 6.05,-5.5 diameter 0.5 hole 0.2
via 7.15,-5.5 diameter 0.5 hole 0.2
via 8.25,-5.5 diameter 0.5 hole 0.2
via 9.35,-5.5 diameter 0.5 hole 0.2
via -9.35,-6.6 diameter 0.5 hole 0.2
via -8.25,-6.6 diameter 0.5 hole 0.2
via -7.15,-6.6 diameter 0.5 hole 0.2
via -6.05,-6.6 diameter 0.5 hole 0.2
via -4.95,-6.6 diameter 0.5 hole 0.2
via -3.85,-6.6 diameter 0.5 hole 0.2
via -2.75,-6.6 diameter 0.5 hole 0.2
via -1.65,-6.6 diameter 0.5 hole 0.2
via -0.55,-6.6 diameter 0.5 hole 0.2
via 0.55,-6.6 diameter 0.5 hole 0.2
via 1.65,-6.6 diameter 0.5 hole 0.2
via 2.75,-6.6 diameter 0.5 hole 0.2
via 3.85,-6.6 diameter 0.5 hole 0.2
via 4.95,-6.6 diameter 0.5 hole 0.2
via 6.05,-6.6 diameter 0.5 hole 0.2
via 7.15,-6.6 diameter 0.5 hole 0.2
via 8.25,-6.6 diameter 0.5 hole 0.2
via 9.35,-6.6 diameter 0.5 hole 0.2
via -9.35,-7.7 diameter 0.5 hole 0.2
via -8.25,-7.7 diameter 0.5 hole 0.2
via -7.15,-7.7 diameter 0.5 hole 0.2
via -6.05,-7.7 diameter 0.5 hole 0.2
via -4.95,-7.7 diameter 0.5 hole 0.2
via -3.85,-7.7 diameter 0.5 hole 0.2
via -2.75,-7.7 diameter 0.5 hole 0.2
via -1.65,-7.7 diameter 0.5 hole 0.2
via -0.55,-7.7 diameter 0.5 hole 0.2
via 0.55,-7.7 diameter 0.5 hole 0.2
via 1.65,-7.7 diameter 0.5 hole 0.2
via 2.75,-7.7 diameter 0.5 hole 0.2
via 3.85,-7.7 diameter 0.5 hole 0.2
via 4.95,-7.7 diameter 0.5 hole 0.2
via 6.05,-7.7 diameter 0.5 hole 0.2
via 7.15,-7.7 diameter 0.5 hole 0.2
via 8.25,-7.7 diameter 0.5 hole 0.2
via 9.35,-7.7 diameter 0.5 hole 0.2
via -9.35,-8.8 diameter 0.5 hole 0.2
via -8.25,-8.8 diameter 0.5 hole 0.2
via -7.15,-8.8 diameter 0.5 hole 0.2
via -6.05,-8.8 diameter 0.5 hole 0.2
via -4.95,-8.8 diameter 0.5 hole 0.2
via -3.85,-8.8 diameter 0.5 hole 0.2
via -2.75,-8.8 diameter 0.5 hole 0.2
via -1.65,-8.8 diameter 0.5 hole 0.2
via -0.55,-8.8 diameter 0.5 hole 0.2
via 0.55,-8.8 diameter 0.5 hole 0.2
via 1.65,-8.8 diameter 0.5 hole 0.2
via 2.75,-8.8 diameter 0.5 hole 0.2
via 3.85,-8.8 diameter 0.5 hole 0.2
via 4.95,-8.8 diameter 0.5 hole 0.2
via 6.05,-8.8 diameter 0.5 hole 0.2
via 7.15,-8.8 diameter 0.5 hole 0.2
via 8.25,-8.8 diameter 0.5 hole 0.2
via 9.35,-8.8 diameter 0.5 hole 0.2
via -9.35,-9.9 diameter 0.5 hole 0.2
via -8.25,-9.9 diameter 0.5 hole 0.2
via -7.15,-9.9 diameter 0.5 hole 0.2
via -6.05,-9.9 diameter 0.5 hole 0.2
via -4.95,-9.9 diameter 0.5 hole 0.2
via -3.85,-9.9 diameter 0.5 hole 0.2
via -2.75,-9.9 diameter 0.5 hole 0.2
via -1.65,-9.9 diameter 0.5 hole 0.2
via -0.55,-9.9 diameter 0.5 hole 0.2
via 0.55,-9.9 diameter 0.5 hole 0.2
via 1.65,-9.9 diameter 0.5 hole 0.2
via 2.75,-9.9 diameter 0.5 hole 0.2
via 3.85,-9.9 diameter 0.5 hole 0.2
via 4.95,-9.9 diameter 0.5 hole 0.2
via 6.05,-9.9 diameter 0.5 hole 0.2
via 7.15,-9.9 diameter 0.5 hole 0.2
via 8.25,-9.9 diameter 0.5 hole 0.2
via 9.35,-9.9 diameter 0.5 hole 0.2
via -9.35,-11 diameter 0.5 hole 0.2
via -8.25,-11 diameter 0.5 hole 0.2
via -7.15,-11 diameter 0.5 hole 0.2
via -6.05,-11 diameter 0.5 hole 0.2
via -4.95,-11 diameter 0.5 hole 0.2
via -3.85,-11 diameter 0.5 hole 0.2
via -2.75,-11 diameter 0.5 hole 0.2
via -1.65,-11 diameter 0.5 hole 0.2
via -0.55,-11 diameter 0.5 hole 0.2
via 0.55,-11 diameter 0.5 hole 0.2
via 1.65,-11 diameter 0.5 hole 0.2
via 2.75,-11 diameter 0.5 hole 0.2
via 3.85,-11 diameter 0.5 hole 0.2
via 4.95,-11 diameter 0.5 hole 0.2
via 6.05,-11 diameter 0.5 hole 0.2
via 7.15,-11 diameter 0.5 hole 0.2
via 8.25,-11 diameter 0.5 hole 0.2
via 9.35,-11 diameter 0.5 hole 0.2
via -9.35,-12.1 diameter 0.5 hole 0.2
via -8.25,-12.1 diameter 0.5 hole 0.2
via -7.15,-12.1 diameter 0.5 hole 0.2
via -6.05,-12.1 diameter 0.5 hole 0.2
via -4.95,-12.1 diameter 0.5 hole 0.2
via -3.85,-12.1 diameter 0.5 hole 0.2
via -2.75,-12.1 diameter 0.5 hole 0.2
via -1.65,-12.1 diameter 0.5 hole 0.2
via -0.55,-12.1 diameter 0.5 hole 0.2
via 0.55,-12.1 diameter 0.5 hole 0.2
via 1.65,-12.1 diameter 0.5 hole 0.2
via 2.75,-12.1 diameter 0.5 hole 0.2
via 3.85,-12.1 diameter 0.5 hole 0.2
via 4.95,-12.1 diameter 0.5 hole 0.2
via 6.05,-12.1 diameter 0.5 hole 0.2
via 7.15,-12.1 diameter 0.5 hole 0.2
via 8.25,-12.1 diameter 0.5 hole 0.2
via 9.35,-12.1 diameter 0.5 hole 0.2
via -9.35,-13.2 diameter 0.5 hole 0.2
via -8.25,-13.2 diameter 0.5 hole 0.2
via -7.15,-13.2 diameter 0.5 hole 0.2
via -6.05,-13.2 diameter 0.5 hole 0.2
via -4.95,-13.2 diameter 0.5 hole 0.2
via -3.85,-13.2 diameter 0.5 hole 0.2
via -2.75,-13.2 diameter 0.5 hole 0.2
via -1.65,-13.2 diameter 0.5 hole 0.2
via -0.55,-13.2 diameter 0.5 hole 0.2
via 0.55,-13.2 diameter 0.5 hole 0.2
via 1.65,-13.2 diameter 0.5 hole 0.2
via 2.75,-13.2 diameter 0.5 hole 0.2
via 3.85,-13.2 diameter 0.5 hole 0.2
via 4.95,-13.2 diameter 0.5 hole 0.2
via 6.05,-13.2 diameter 0.5 hole 0.2
via 7.15,-13.2 diameter 0.5 hole 0.2
via 8.25,-13.2 diameter 0.5 hole 0.2
via 9.35,-13.2 diameter 0.5 hole 0.2
via -9.35,-14.3 diameter 0.5 hole 0.2
via -8.25,-14.3 diameter 0.5 hole 0.2
via -7.15,-14.3 diameter 0.5 hole 0.2
via -6.05,-14.3 diameter 0.5 hole 0.2
via -4.95,-14.3 diameter 0.5 hole 0.2
via -3.85,-14.3 diameter 0.5 hole 0.2
via -2.75,-14.3 diameter 0.5 hole 0.2
via -1.65,-14.3 diameter 0.5 hole 0.2
via -0.55,-14.3 diameter 0.5 hole 0.2
via 0.55,-14.3 diameter 0.5 hole 0.2
via 1.65,-14.3 diameter 0.5 hole 0.2
via 2.75,-14.3 diameter 0.5 hole 0.2
via 3.85,-14.3 diameter 0.5 hole 0.2
via 4.95,-14.3 diameter 0.5 hole 0.2
via 6.05,-14.3 diameter 0.5 hole 0.2
via 7.15,-14.3 diameter 0.5 hole 0.2
via 8.25,-14.3 diameter 0.5 hole 0.2
via 9.35,-14.3 diameter 0.5 hole 0.2
Top Overlay:
  lines w0.254: -12.598,-18.679 -12.598,18.821 12.402,18.821 12.402,-18.679 -12.598,-18.679
3D body: height 5.1, standoff 0, extent -12.598,-18.679 12.402,18.821

## Murata Isolated Twin Supply [mm] "NMD050515SC"
pads (6):
  round 1.35 hole 0.8: 1(-7.62,0) 2(-5.08,0) 4(0,0) 5(2.54,0) 6(5.08,0) 7(7.62,0)
Top Overlay:
  lines w0.254: -9.75,-3 9.7,-3 ; -9.75,-2.921 -9.75,2.921 ; -9.75,3 9.75,3 ; 9.779,-2.921 9.779,2.921
Mechanical 1:
  lines w0.254: -9.75,-3 9.7,-3 9.779,-2.921 9.779,2.921 ; -9.75,-2.921 -9.75,2.921 ; -9.75,3 9.75,3

## Murata Isolated Twin Supply - duplicate [mm] "NMD050515SC"
pads (6):
  round 1.35 hole 0.8: 1(-7.62,0) 2(-5.08,0) 4(0,0) 5(2.54,0) 6(5.08,0) 7(7.62,0)
Top Overlay:
  lines w0.254: -9.75,-3 9.7,-3 ; -9.75,-2.921 -9.75,2.921 ; -9.75,3 9.75,3 ; 9.779,-2.921 9.779,2.921
Mechanical 1:
  lines w0.254: -9.75,-3 9.7,-3 9.779,-2.921 9.779,2.921 ; -9.75,-2.921 -9.75,2.921 ; -9.75,3 9.75,3

## N10A [mm] "DIP; 10 Leads; Row Spacing 7.62 mm; Pitch 2.54 mm"
height 5.08
pads (10):
  rect 1.5x1.5 hole 0.9: 1(-3.81,5.08)
  round 1.5 hole 0.9: 2(-3.81,2.54) 3(-3.81,0) 4(-3.81,-2.54) 5(-3.81,-5.08) 6(3.81,-5.08) 7(3.81,-2.54) 8(3.81,0) 9(3.81,2.54) 10(3.81,5.08)
Top Overlay:
  circle w0.6: c-1.65,6.25 r0.3
  circle w0.25: c-3.81,6.38 r0.125
  lines w0.2: -2.65,-7.25 2.65,-7.25 2.65,7.25 0.635,7.25 cw(c0,7.25) -0.635,7.25 -2.65,7.25 -2.65,-7.25
Mechanical 13:
  circle w0.1: c-2.35,6.35 r0.5
  lines w0.1: -3.25,-7.25 3.25,-7.25 3.25,7.25 -3.25,7.25 -3.25,-7.25
Mechanical 15:
  lines w0.1: -0.5,0 0.5,0 ; 0,-0.5 0,0.5
3D body: height 5.08, standoff 0, extent -3.25,-7.25 3.25,7.25

## Net Tie [mm]
pads (2):
  rect 1x1 smd mask+0.05: 1(1.016,0) 2(-1.016,0)
Top Layer:
  rectangle: -0.559,-0.5 0.584,0.5

## Net Tie - duplicate [mm]
pads (2):
  rect 1x1 smd mask+0.05: 1(1.016,0) 2(-1.016,0)
Top Layer:
  rectangle: -0.559,-0.229 0.584,0.229

## NPSIP4A [mm] "SIP; 4 Leads; Body 10 x 11.5 x 7.5 mm (typ); Pitch 2.54 mm"
height 10.6
pads (4):
  rect 1.2x1.2 hole 0.6: 1(-3.81,0)
  round 1.2 hole 0.6: 2(-1.27,0) 3(1.27,0) 4(3.81,0)
Top Overlay:
  rectangle: -5.83,-1.65 5.87,-1.25
  lines w0.2: -5.75,-1.25 -5.75,6.25 5.75,6.25 5.75,-1.25
  text "4" at 3.302,-3.52 h1.5
  text "3" at 0.762,-3.52 h1.5
  text "2" at -1.778,-3.52 h1.5
  text "1" at -3.81,-3.52 h1.5

## P04A [mm] "TO, Thru-Hole, Vertical, Heatsink Mounted; 4 In-Line Leads; Pitch 2.54 mm"
height 20.6
pads (4):
  rect 1.7x1.7 hole 1.1: 1(-3.81,0)
  round 1.7 hole 1.1: 2(-1.27,0) 3(1.27,0) 4(3.81,0)
Top Overlay:
  rectangle: -5.25,1.311 5.25,1.711
  lines w0.2: -5.25,1.6 -5.25,-2.5 5.25,-2.5 5.25,1.6
  text "4" at 3.31,-4.475 h1.5
  text "1" at -4.06,-4.475 h1.5

## PCBComponent_1 [mm]

## PIN1 [mm] "Generic Antenna; 1 Lead"
pads (1):
  rect 1.5x1.5 hole 0.9: 1(0,0)
Top Overlay:
  circle w0.25: c0,2.05 r0.125
  lines w0.2: -1.4,-1.4 1.4,-1.4 1.4,1.4 -1.4,1.4 -1.4,-1.4

## PIN1 - duplicate [mm] "Connector; Plug"
pads (1):
  rect 1.5x1.5 hole 0.9: 1(0,0)
Top Overlay:
  circle w0.25: c0,2.05 r0.125
  lines w0.2: -1.4,-1.4 -1.4,1.4 1.4,1.4 1.4,-1.4 -1.4,-1.4

## PIN2 [mm] "Photosensitive Diode; 2 Leads"
pads (2):
  rect 1.5x1.5 hole 0.9: 1(0,0)
  round 1.5 hole 0.9: 2(2.54,0)
Top Overlay:
  circle w0.25: c0,2.05 r0.125
  lines w0.2: -1.4,-1.4 -1.4,1.4 3.94,1.4 3.94,-1.4 -1.4,-1.4

## PIN22 [mm] "Connector; Edge; 22 Position"
pads (22):
  rect 1.5x1.5 hole 0.9: 1(0,0)
  round 1.5 hole 0.9: 2(2.54,0) 3(5.08,0) 4(7.62,0) 5(10.16,0) 6(12.7,0) 7(15.24,0) 8(17.78,0) 10(22.86,0) 11(25.4,0) 12(27.94,0) 13(30.48,0) 14(33.02,0) 15(35.56,0) 16(38.1,0) 17(40.64,0) 18(43.18,0) 19(45.72,0) 20(48.26,0) 21(50.8,0) 22(53.34,0)
  oval 1.51x1.5 hole 0.9: 9(20.32,0)
Top Overlay:
  circle w0.25: c0,2.05 r0.125
  lines w0.2: -1.4,-1.4 54.74,-1.4 54.74,1.4 -1.4,1.4 -1.4,-1.4

## PIN44 [mm] "Connector; Edge; 44 Position"
pads (44):
  rect 1.5x1.5 hole 0.9: 1(0,0)
  round 1.5 hole 0.9: 2(2.54,0) 3(5.08,0) 4(7.62,0) 5(10.16,0) 6(12.7,0) 7(15.24,0) 8(17.78,0) 10(22.86,0) 11(25.4,0) 12(27.94,0) 13(30.48,0) 14(33.02,0) 15(35.56,0) 16(38.1,0) 17(40.64,0) 18(43.18,0) 19(45.72,0) 20(48.26,0) 21(50.8,0) 22(53.34,0) 23(55.88,0) 24(58.42,0) 25(60.96,0) 26(63.5,0) 27(66.04,0) 28(68.58,0) 29(71.12,0) 30(73.66,0) 31(76.2,0) 32(78.74,0) 33(81.28,0) 34(83.82,0) 35(86.36,0) 36(88.9,0) 37(91.44,0) 38(93.98,0) 39(96.52,0) 40(99.06,0) 41(101.6,0) 42(104.14,0) 43(106.68,0) 44(109.22,0)
  oval 1.51x1.5 hole 0.9: 9(20.32,0)
Top Overlay:
  circle w0.25: c0,2.05 r0.125
  lines w0.2: -1.4,-1.4 110.62,-1.4 110.62,1.4 -1.4,1.4 -1.4,-1.4